# Altium footprint library WR-TBL_Pluggable Connector_3.50mm.PcbLib: 175 footprints (part 6 of 11)
Each footprint in its own frame and in the unit in brackets; x right, y up, seen from the top. Pads: shape width x height; smd on the part's side, far side on the other; paste and mask are expansions set on the pad; w line width, h text height; cw(c..) or ccw(c..) is an arc to the next point about the centre after c.
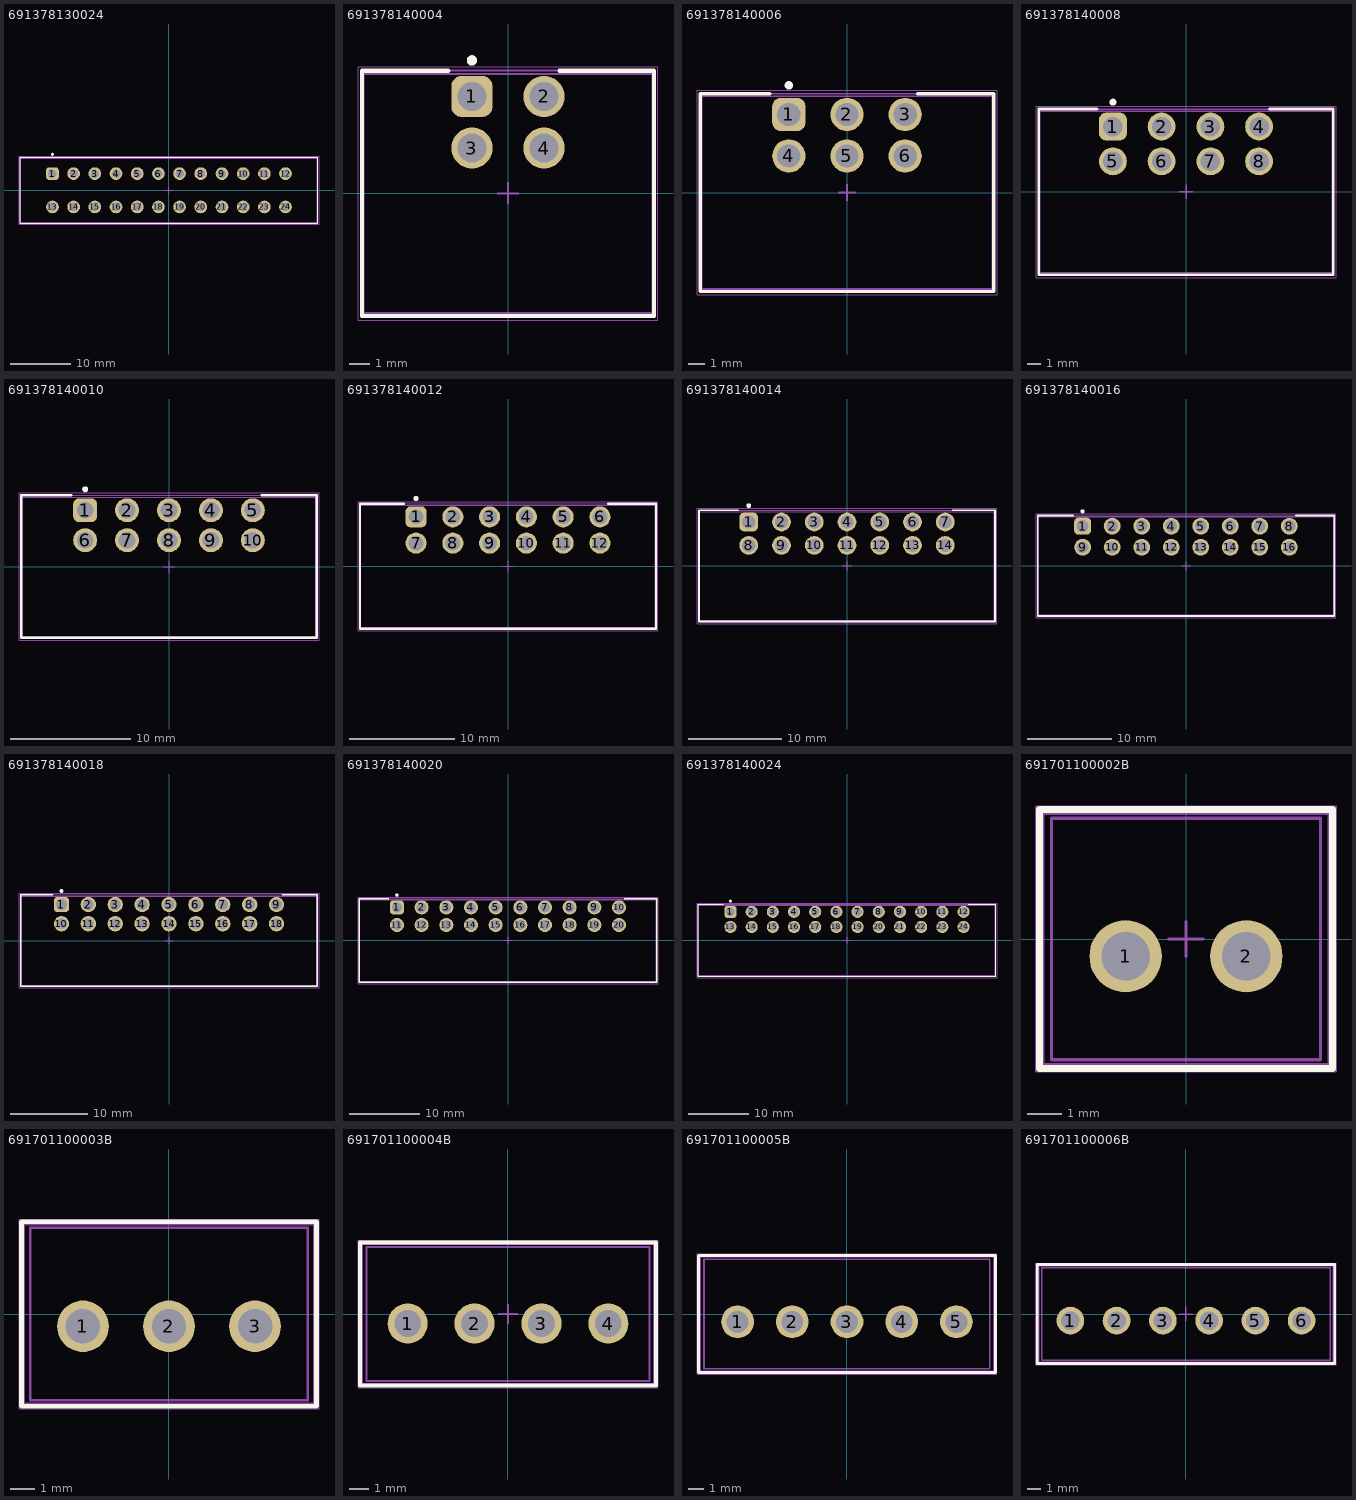
[diagram p5: the footprints below, top view; thin cyan lines are the x and y axes]

## 691378130024 [mm] "PCB Header, pitch 3.5mm, 24p"
height 10
pads (24):
  rrect50% 2.1x2.1 hole 1.4: 1(-19.25,2.75)
  round 2.1 hole 1.4: 2(-15.75,2.75) 3(-12.25,2.75) 4(-8.75,2.75) 5(-5.25,2.75) 6(-1.75,2.75) 7(1.75,2.75) 8(5.25,2.75) 9(8.75,2.75) 10(12.25,2.75) 11(15.75,2.75) 12(19.25,2.75) 13(-19.25,-2.75) 14(-15.75,-2.75) 15(-12.25,-2.75) 16(-8.75,-2.75) 17(-5.25,-2.75) 18(-1.75,-2.75) 19(1.75,-2.75) 20(5.25,-2.75) 21(8.75,-2.75) 22(12.25,-2.75) 23(15.75,-2.75) 24(19.25,-2.75)
Top Overlay:
  circle w0.25: c-19.25,5.95 r0.125
  lines w0.2: -24.575,-5.45 24.575,-5.45 24.575,5.45 -24.575,5.45 -24.575,-5.45
Top Assembly:
  lines w0.1: -24.575,-5.45 24.575,-5.45 24.575,5.45 -24.575,5.45 -24.575,-5.45
Top Designator:
  text ".Designator" at -3.647,-0.357 h1
Top 3D Body:
  lines w0.1: -24.5,-5.3 24.5,-5.3 24.5,5.3 -24.5,5.3 -24.5,-5.3
Top Courtyard:
  lines w0.05: -24.775,-5.65 24.775,-5.65 24.775,5.65 -24.775,5.65 -24.775,-5.65
Top Component Center:
  lines w0.1: -0.5,0 0.5,0 ; 0,-0.5 0,0.5
3D body "691378130024.stp": height 10.05, standoff -3.45, extent -24.5,-5.3 24.5,5.3

## 691378140004 [mm] "PCB Header, pitch 3.5mm, 04p"
height 10.8
pads (4):
  rrect50% 2x2 hole 1.4: 1(-1.75,4.7)
  round 2 hole 1.4: 2(1.75,4.7) 3(-1.75,2.2) 4(1.75,2.2)
Top Overlay:
  circle w0.25: c-1.75,6.45 r0.125
  lines w0.2: -2.9,5.95 -7.075,5.95 -7.075,-5.95 7.075,-5.95 7.075,5.95 2.5,5.95
Top Assembly:
  lines w0.1: -7.075,-5.95 7.075,-5.95 7.075,5.95 -7.075,5.95 -7.075,-5.95
Top Designator:
  text ".Designator" at -3.647,-0.357 h1
Top 3D Body:
  lines w0.1: -7,-5.8 -7,5.8 7,5.8 7,-5.8 -7,-5.8
Top Courtyard:
  lines w0.05: -7.275,-6.15 -7.275,6.15 7.275,6.15 7.275,-6.15 -7.275,-6.15
Top Component Center:
  lines w0.1: -0.5,0 0.5,0 ; 0,-0.5 0,0.5
3D body "691378140004.stp": height 10.85, standoff -3.45, extent -7,-5.8 7,5.8

## 691378140006 [mm] "PCB Header, pitch 3.5mm, 06p"
height 10.8
pads (6):
  rrect50% 2x2 hole 1.4: 1(-3.5,4.7)
  round 2 hole 1.4: 2(0,4.7) 3(3.5,4.7) 4(-3.5,2.2) 5(0,2.2) 6(3.5,2.2)
Top Overlay:
  circle w0.25: c-3.5,6.45 r0.125
  lines w0.2: -4.65,5.95 -8.825,5.95 -8.825,-5.95 8.825,-5.95 8.825,5.95 4.25,5.95
Top Assembly:
  lines w0.1: -8.825,-5.95 -8.825,5.95 8.825,5.95 8.825,-5.95 -8.825,-5.95
Top Designator:
  text ".Designator" at -3.647,-0.357 h1
Top 3D Body:
  lines w0.1: -8.75,-5.8 8.75,-5.8 8.75,5.8 -8.75,5.8 -8.75,-5.8
Top Courtyard:
  lines w0.05: -9.025,-6.15 9.025,-6.15 9.025,6.15 -9.025,6.15 -9.025,-6.15
Top Component Center:
  lines w0.1: -0.5,0 0.5,0 ; 0,-0.5 0,0.5
3D body "691378140006.stp": height 10.85, standoff -3.45, extent -8.75,-5.8 8.75,5.8

## 691378140008 [mm] "PCB Header, pitch 3.5mm, 08p"
height 10.8
pads (8):
  rrect50% 2x2 hole 1.4: 1(-5.25,4.7)
  round 2 hole 1.4: 2(-1.75,4.7) 3(1.75,4.7) 4(5.25,4.7) 5(-5.25,2.2) 6(-1.75,2.2) 7(1.75,2.2) 8(5.25,2.2)
Top Overlay:
  circle w0.25: c-5.25,6.45 r0.125
  lines w0.2: -6.4,5.95 -10.575,5.95 -10.575,-5.95 10.575,-5.95 10.575,5.95 6,5.95
Top Assembly:
  lines w0.1: -10.575,-5.95 -10.575,5.95 10.575,5.95 10.575,-5.95 -10.575,-5.95
Top Designator:
  text ".Designator" at -3.647,-0.357 h1
Top 3D Body:
  lines w0.1: -10.5,-5.8 10.5,-5.8 10.5,5.8 -10.5,5.8 -10.5,-5.8
Top Courtyard:
  lines w0.05: -10.775,-6.15 10.775,-6.15 10.775,6.15 -10.775,6.15 -10.775,-6.15
Top Component Center:
  lines w0.1: -0.5,0 0.5,0 ; 0,-0.5 0,0.5
3D body "691378140008.stp": height 10.85, standoff -3.45, extent -10.5,-5.8 10.5,5.8

## 691378140010 [mm] "PCB Header, pitch 3.5mm, 10p"
height 10.8
pads (10):
  rrect50% 2x2 hole 1.4: 1(-7,4.7)
  round 2 hole 1.4: 2(-3.5,4.7) 3(0,4.7) 4(3.5,4.7) 5(7,4.7) 6(-7,2.2) 7(-3.5,2.2) 8(0,2.2) 9(3.5,2.2) 10(7,2.2)
Top Overlay:
  circle w0.25: c-7,6.45 r0.125
  lines w0.2: -8.15,5.95 -12.325,5.95 -12.325,-5.95 12.325,-5.95 12.325,5.95 7.75,5.95
Top Assembly:
  lines w0.1: -12.325,-5.95 -12.325,5.95 12.325,5.95 12.325,-5.95 -12.325,-5.95
Top Designator:
  text ".Designator" at -3.647,-0.357 h1
Top 3D Body:
  lines w0.1: -12.25,-5.8 12.25,-5.8 12.25,5.8 -12.25,5.8 -12.25,-5.8
Top Courtyard:
  lines w0.05: -12.525,-6.15 12.525,-6.15 12.525,6.15 -12.525,6.15 -12.525,-6.15
Top Component Center:
  lines w0.1: -0.5,0 0.5,0 ; 0,-0.5 0,0.5
3D body "691378140010.stp": height 10.85, standoff -3.45, extent -12.25,-5.8 12.25,5.8

## 691378140012 [mm] "PCB Header, pitch 3.5mm, 12p"
height 10.8
pads (12):
  rrect50% 2x2 hole 1.4: 1(-8.75,4.7)
  round 2 hole 1.4: 2(-5.25,4.7) 3(-1.75,4.7) 4(1.75,4.7) 5(5.25,4.7) 6(8.75,4.7) 7(-8.75,2.2) 8(-5.25,2.2) 9(-1.75,2.2) 10(1.75,2.2) 11(5.25,2.2) 12(8.75,2.2)
Top Overlay:
  circle w0.25: c-8.75,6.45 r0.125
  lines w0.2: -9.9,5.95 -14.075,5.95 -14.075,-5.95 14.075,-5.95 14.075,5.95 9.5,5.95
Top Assembly:
  lines w0.1: -14.075,-5.95 -14.075,5.95 14.075,5.95 14.075,-5.95 -14.075,-5.95
Top Designator:
  text ".Designator" at -3.647,-0.357 h1
Top 3D Body:
  lines w0.1: -14,-5.8 14,-5.8 14,5.8 -14,5.8 -14,-5.8
Top Courtyard:
  lines w0.05: -14.275,-6.15 14.275,-6.15 14.275,6.15 -14.275,6.15 -14.275,-6.15
Top Component Center:
  lines w0.1: -0.5,0 0.5,0 ; 0,-0.5 0,0.5
3D body "691378140012.stp": height 10.85, standoff -3.45, extent -14,-5.8 14,5.8

## 691378140014 [mm] "PCB Header, pitch 3.5mm, 14p"
height 10.8
pads (14):
  rrect50% 2x2 hole 1.4: 1(-10.5,4.7)
  round 2 hole 1.4: 2(-7,4.7) 3(-3.5,4.7) 4(0,4.7) 5(3.5,4.7) 6(7,4.7) 7(10.5,4.7) 8(-10.5,2.2) 9(-7,2.2) 10(-3.5,2.2) 11(0,2.2) 12(3.5,2.2) 13(7,2.2) 14(10.5,2.2)
Top Overlay:
  circle w0.25: c-10.5,6.45 r0.125
  lines w0.2: -11.65,5.95 -15.825,5.95 -15.825,-5.95 15.825,-5.95 15.825,5.95 11.25,5.95
Top Assembly:
  lines w0.1: -15.825,-5.95 15.825,-5.95 15.825,5.95 -15.825,5.95 -15.825,-5.95
Top Designator:
  text ".Designator" at -3.647,-0.357 h1
Top 3D Body:
  lines w0.1: -15.75,-5.8 -15.75,5.8 15.75,5.8 15.75,-5.8 -15.75,-5.8
Top Courtyard:
  lines w0.05: -16.025,-6.15 -16.025,6.15 16.025,6.15 16.025,-6.15 -16.025,-6.15
Top Component Center:
  lines w0.1: -0.5,0 0.5,0 ; 0,-0.5 0,0.5
3D body "691378140014.stp": height 10.85, standoff -3.45, extent -15.75,-5.8 15.75,5.8

## 691378140016 [mm] "PCB Header, pitch 3.5mm, 16p"
height 10.8
pads (16):
  rrect50% 2x2 hole 1.4: 1(-12.25,4.7)
  round 2 hole 1.4: 2(-8.75,4.7) 3(-5.25,4.7) 4(-1.75,4.7) 5(1.75,4.7) 6(5.25,4.7) 7(8.75,4.7) 8(12.25,4.7) 9(-12.25,2.2) 10(-8.75,2.2) 11(-5.25,2.2) 12(-1.75,2.2) 13(1.75,2.2) 14(5.25,2.2) 15(8.75,2.2) 16(12.25,2.2)
Top Overlay:
  circle w0.25: c-12.25,6.45 r0.125
  lines w0.2: -13.4,5.95 -17.575,5.95 -17.575,-5.95 17.575,-5.95 17.575,5.95 13,5.95
Top Assembly:
  lines w0.1: -17.575,-5.95 17.575,-5.95 17.575,5.95 -17.575,5.95 -17.575,-5.95
Top Designator:
  text ".Designator" at -3.647,-0.357 h1
Top 3D Body:
  lines w0.1: -17.5,-5.8 -17.5,5.8 17.5,5.8 17.5,-5.8 -17.5,-5.8
Top Courtyard:
  lines w0.05: -17.775,-6.15 -17.775,6.15 17.775,6.15 17.775,-6.15 -17.775,-6.15
Top Component Center:
  lines w0.1: -0.5,0 0.5,0 ; 0,-0.5 0,0.5
3D body "691378140016.stp": height 10.85, standoff -3.45, extent -17.5,-5.8 17.5,5.8

## 691378140018 [mm] "PCB Header, pitch 3.5mm, 18p"
height 10.8
pads (18):
  rrect50% 2x2 hole 1.4: 1(-14,4.7)
  round 2 hole 1.4: 2(-10.5,4.7) 3(-7,4.7) 4(-3.5,4.7) 5(0,4.7) 6(3.5,4.7) 7(7,4.7) 8(10.5,4.7) 9(14,4.7) 10(-14,2.2) 11(-10.5,2.2) 12(-7,2.2) 13(-3.5,2.2) 14(0,2.2) 15(3.5,2.2) 16(7,2.2) 17(10.5,2.2) 18(14,2.2)
Top Overlay:
  circle w0.25: c-14,6.45 r0.125
  lines w0.2: -15.15,5.95 -19.325,5.95 -19.325,-5.95 19.325,-5.95 19.325,5.95 14.75,5.95
Top Assembly:
  lines w0.1: -19.325,-5.95 -19.325,5.95 19.325,5.95 19.325,-5.95 -19.325,-5.95
Top Designator:
  text ".Designator" at -3.647,-0.357 h1
Top 3D Body:
  lines w0.1: -19.25,-5.8 19.25,-5.8 19.25,5.8 -19.25,5.8 -19.25,-5.8
Top Courtyard:
  lines w0.05: -19.525,-6.15 19.525,-6.15 19.525,6.15 -19.525,6.15 -19.525,-6.15
Top Component Center:
  lines w0.1: -0.5,0 0.5,0 ; 0,-0.5 0,0.5
3D body "691378140018.stp": height 10.85, standoff -3.45, extent -19.25,-5.8 19.25,5.8

## 691378140020 [mm] "PCB Header, pitch 3.5mm, 20p"
height 10.8
pads (20):
  rrect50% 2x2 hole 1.4: 1(-15.75,4.7)
  round 2 hole 1.4: 2(-12.25,4.7) 3(-8.75,4.7) 4(-5.25,4.7) 5(-1.75,4.7) 6(1.75,4.7) 7(5.25,4.7) 8(8.75,4.7) 9(12.25,4.7) 10(15.75,4.7) 11(-15.75,2.2) 12(-12.25,2.2) 13(-8.75,2.2) 14(-5.25,2.2) 15(-1.75,2.2) 16(1.75,2.2) 17(5.25,2.2) 18(8.75,2.2) 19(12.25,2.2) 20(15.75,2.2)
Top Overlay:
  circle w0.25: c-15.75,6.45 r0.125
  lines w0.2: -16.9,5.95 -21.075,5.95 -21.075,-5.95 21.075,-5.95 21.075,5.95 16.5,5.95
Top Assembly:
  lines w0.1: -21.075,-5.95 -21.075,5.95 21.075,5.95 21.075,-5.95 -21.075,-5.95
Top Designator:
  text ".Designator" at -3.647,-0.357 h1
Top 3D Body:
  lines w0.1: -21,-5.8 21,-5.8 21,5.8 -21,5.8 -21,-5.8
Top Courtyard:
  lines w0.05: -21.275,-6.15 21.275,-6.15 21.275,6.15 -21.275,6.15 -21.275,-6.15
Top Component Center:
  lines w0.1: -0.5,0 0.5,0 ; 0,-0.5 0,0.5
3D body "691378140020.stp": height 10.85, standoff -3.45, extent -21,-5.8 21,5.8

## 691378140024 [mm] "PCB Header, pitch 3.5mm, 24p"
height 10.8
pads (24):
  rrect50% 2x2 hole 1.4: 1(-19.25,4.7)
  round 2 hole 1.4: 2(-15.75,4.7) 3(-12.25,4.7) 4(-8.75,4.7) 5(-5.25,4.7) 6(-1.75,4.7) 7(1.75,4.7) 8(5.25,4.7) 9(8.75,4.7) 10(12.25,4.7) 11(15.75,4.7) 12(19.25,4.7) 13(-19.25,2.2) 14(-15.75,2.2) 15(-12.25,2.2) 16(-8.75,2.2) 17(-5.25,2.2) 18(-1.75,2.2) 19(1.75,2.2) 20(5.25,2.2) 21(8.75,2.2) 22(12.25,2.2) 23(15.75,2.2) 24(19.25,2.2)
Top Overlay:
  circle w0.25: c-19.25,6.45 r0.125
  lines w0.2: -20.4,5.95 -24.575,5.95 -24.575,-5.95 24.575,-5.95 24.575,5.95 20,5.95
Top Assembly:
  lines w0.1: -24.575,-5.95 -24.575,5.95 24.575,5.95 24.575,-5.95 -24.575,-5.95
Top Designator:
  text ".Designator" at -3.647,-0.357 h1
Top 3D Body:
  lines w0.1: -24.5,-5.8 24.5,-5.8 24.5,5.8 -24.5,5.8 -24.5,-5.8
Top Courtyard:
  lines w0.05: -24.775,-6.15 24.775,-6.15 24.775,6.15 -24.775,6.15 -24.775,-6.15
Top Component Center:
  lines w0.1: -0.5,0 0.5,0 ; 0,-0.5 0,0.5
3D body "691378140024.stp": height 10.85, standoff -3.45, extent -24.5,-5.8 24.5,5.8

## 691701100002B [mm] "3.50 mm Vertical PCB Header THR type, 02p"
height 9.2
pads (2):
  round 2.1 hole 1.4: 1(-1.75,-0.5) 2(1.75,-0.5)
Top Overlay:
  lines w0.2: -4.25,-3.75 4.25,-3.75 4.25,3.75 -4.25,3.75 -4.25,-3.75
Top Paste:
  region: 3.3,1.75 3.3,-2.75 0.2,-2.75 0.2,1.75
  region: -0.2,1.75 -0.2,-2.75 -3.3,-2.75 -3.3,1.75
Assembly Notes:
  text "Stencil thickness : 120 μm" at -5.156,-4.601 h1
Top Assembly:
  lines w0.1: -4.15,-3.65 4.15,-3.65 4.15,3.65 -4.15,3.65 -4.15,-3.65
Top Designator:
  text ".Designator" at -3.647,-0.357 h1
Top 3D Body:
  lines w0.1: -3.9,-3.5 3.9,-3.5 3.9,3.5 -3.9,3.5 -3.9,-3.5
Top Courtyard:
  lines w0.05: -4.35,-3.85 -4.35,3.85 4.35,3.85 4.35,-3.85 -4.35,-3.85
Top Component Center:
  lines w0.1: -0.5,0 0.5,0 ; 0,-0.5 0,0.5
3D body "691701100002B.stp": height 9.25, standoff -2.55, extent -4.1,-3.5 4.1,3.5

## 691701100003B [mm] "3.50 mm Vertical PCB Header THR type, 03p"
height 9.2
pads (3):
  round 2.1 hole 1.4: 1(-3.5,-0.5) 2(0,-0.5) 3(3.5,-0.5)
Top Overlay:
  lines w0.2: -6,-3.75 6,-3.75 6,3.75 -6,3.75 -6,-3.75
Top Paste:
  region: -1.95,1.75 -1.95,-2.75 -5.05,-2.75 -5.05,1.75
  region: 1.55,1.75 1.55,-2.75 -1.55,-2.75 -1.55,1.75
  region: 5.05,1.75 5.05,-2.75 1.95,-2.75 1.95,1.75
Assembly Notes:
  text "Stencil thickness : 120 μm" at -5.156,-4.601 h1
Top Assembly:
  lines w0.1: -5.9,-3.65 5.9,-3.65 5.9,3.65 -5.9,3.65 -5.9,-3.65
Top Designator:
  text ".Designator" at -3.647,-0.357 h1
Top 3D Body:
  lines w0.1: -5.65,-3.5 5.65,-3.5 5.65,3.5 -5.65,3.5 -5.65,-3.5
Top Courtyard:
  lines w0.05: -6.1,-3.85 -6.1,3.85 6.1,3.85 6.1,-3.85 -6.1,-3.85
Top Component Center:
  lines w0.1: -0.5,0 0.5,0 ; 0,-0.5 0,0.5
3D body "691701100003B.stp": height 9.25, standoff -2.55, extent -5.85,-3.5 5.85,3.5

## 691701100004B [mm] "3.50 mm Vertical PCB Header THR type, 04p"
height 9.2
pads (4):
  round 2.1 hole 1.4: 1(-5.25,-0.5) 2(-1.75,-0.5) 3(1.75,-0.5) 4(5.25,-0.5)
Top Overlay:
  lines w0.2: -7.75,-3.75 -7.75,3.75 7.75,3.75 7.75,-3.75 -7.75,-3.75
Top Paste:
  region: -3.7,1.75 -3.7,-2.75 -6.8,-2.75 -6.8,1.75
  region: -0.2,1.75 -0.2,-2.75 -3.3,-2.75 -3.3,1.75
  region: 3.3,1.75 3.3,-2.75 0.2,-2.75 0.2,1.75
  region: 6.8,1.75 6.8,-2.75 3.7,-2.75 3.7,1.75
Assembly Notes:
  text "Stencil thickness : 120 μm" at -5.156,-4.601 h1
Top Assembly:
  lines w0.1: -7.65,-3.65 -7.65,3.65 7.65,3.65 7.65,-3.65 -7.65,-3.65
Top Designator:
  text ".Designator" at -3.647,-0.357 h1
Top 3D Body:
  lines w0.1: -7.4,-3.5 -7.4,3.5 7.4,3.5 7.4,-3.5 -7.4,-3.5
Top Courtyard:
  lines w0.05: -7.85,-3.85 7.85,-3.85 7.85,3.85 -7.85,3.85 -7.85,-3.85
Top Component Center:
  lines w0.1: -0.5,0 0.5,0 ; 0,-0.5 0,0.5
3D body "691701100004B.stp": height 9.25, standoff -2.55, extent -7.6,-3.5 7.6,3.5

## 691701100005B [mm] "3.50 mm Vertical PCB Header THR type, 05p"
height 9.2
pads (5):
  round 2.1 hole 1.4: 1(-7,-0.5) 2(-3.5,-0.5) 3(0,-0.5) 4(3.5,-0.5) 5(7,-0.5)
Top Overlay:
  lines w0.2: -9.5,-3.75 -9.5,3.75 9.5,3.75 9.5,-3.75 -9.5,-3.75
Top Paste:
  region: -5.45,1.75 -5.45,-2.75 -8.55,-2.75 -8.55,1.75
  region: -1.95,1.75 -1.95,-2.75 -5.05,-2.75 -5.05,1.75
  region: 1.55,1.75 1.55,-2.75 -1.55,-2.75 -1.55,1.75
  region: 5.05,1.75 5.05,-2.75 1.95,-2.75 1.95,1.75
  region: 8.55,1.75 8.55,-2.75 5.45,-2.75 5.45,1.75
Assembly Notes:
  text "Stencil thickness : 120 μm" at -5.156,-4.601 h1
Top Assembly:
  lines w0.1: -9.4,-3.65 -9.4,3.65 9.4,3.65 9.4,-3.65 -9.4,-3.65
Top Designator:
  text ".Designator" at -3.647,-0.357 h1
Top 3D Body:
  lines w0.1: -9.15,-3.5 -9.15,3.5 9.15,3.5 9.15,-3.5 -9.15,-3.5
Top Courtyard:
  lines w0.05: -9.6,-3.85 9.6,-3.85 9.6,3.85 -9.6,3.85 -9.6,-3.85
Top Component Center:
  lines w0.1: -0.5,0 0.5,0 ; 0,-0.5 0,0.5
3D body "691701100005B.stp": height 9.25, standoff -2.55, extent -9.35,-3.5 9.35,3.5

## 691701100006B [mm] "3.50 mm Vertical PCB Header THR type, 06p"
height 9.2
pads (6):
  round 2.1 hole 1.4: 1(-8.75,-0.5) 2(-5.25,-0.5) 3(-1.75,-0.5) 4(1.75,-0.5) 5(5.25,-0.5) 6(8.75,-0.5)
Top Overlay:
  lines w0.2: -11.25,-3.75 11.25,-3.75 11.25,3.75 -11.25,3.75 -11.25,-3.75
Top Paste:
  region: 6.8,1.75 6.8,-2.75 3.7,-2.75 3.7,1.75
  region: 3.3,1.75 3.3,-2.75 0.2,-2.75 0.2,1.75
  region: -0.2,1.75 -0.2,-2.75 -3.3,-2.75 -3.3,1.75
  region: -3.7,1.75 -3.7,-2.75 -6.8,-2.75 -6.8,1.75
  region: -7.2,1.75 -7.2,-2.75 -10.3,-2.75 -10.3,1.75
  region: 10.3,1.75 10.3,-2.75 7.2,-2.75 7.2,1.75
Assembly Notes:
  text "Stencil thickness : 120 μm" at -5.156,-4.601 h1
Top Assembly:
  lines w0.1: -11.15,-3.65 11.15,-3.65 11.15,3.65 -11.15,3.65 -11.15,-3.65
Top Designator:
  text ".Designator" at -3.647,-0.357 h1
Top 3D Body:
  lines w0.1: -10.9,-3.5 10.9,-3.5 10.9,3.5 -10.9,3.5 -10.9,-3.5
Top Courtyard:
  lines w0.05: -11.35,-3.85 -11.35,3.85 11.35,3.85 11.35,-3.85 -11.35,-3.85
Top Component Center:
  lines w0.1: -0.5,0 0.5,0 ; 0,-0.5 0,0.5
3D body "691701100006B.stp": height 9.25, standoff -2.55, extent -11.1,-3.5 11.1,3.5